# Altium footprint library Package_DFN_QFN.PcbLib: 735 footprints (part 33 of 46)
Each footprint in its own frame and in the unit in brackets; x right, y up, seen from the top. Pads: shape width x height; smd on the part's side, far side on the other; paste and mask are expansions set on the pad; w line width, h text height; cw(c..) or ccw(c..) is an arc to the next point about the centre after c.
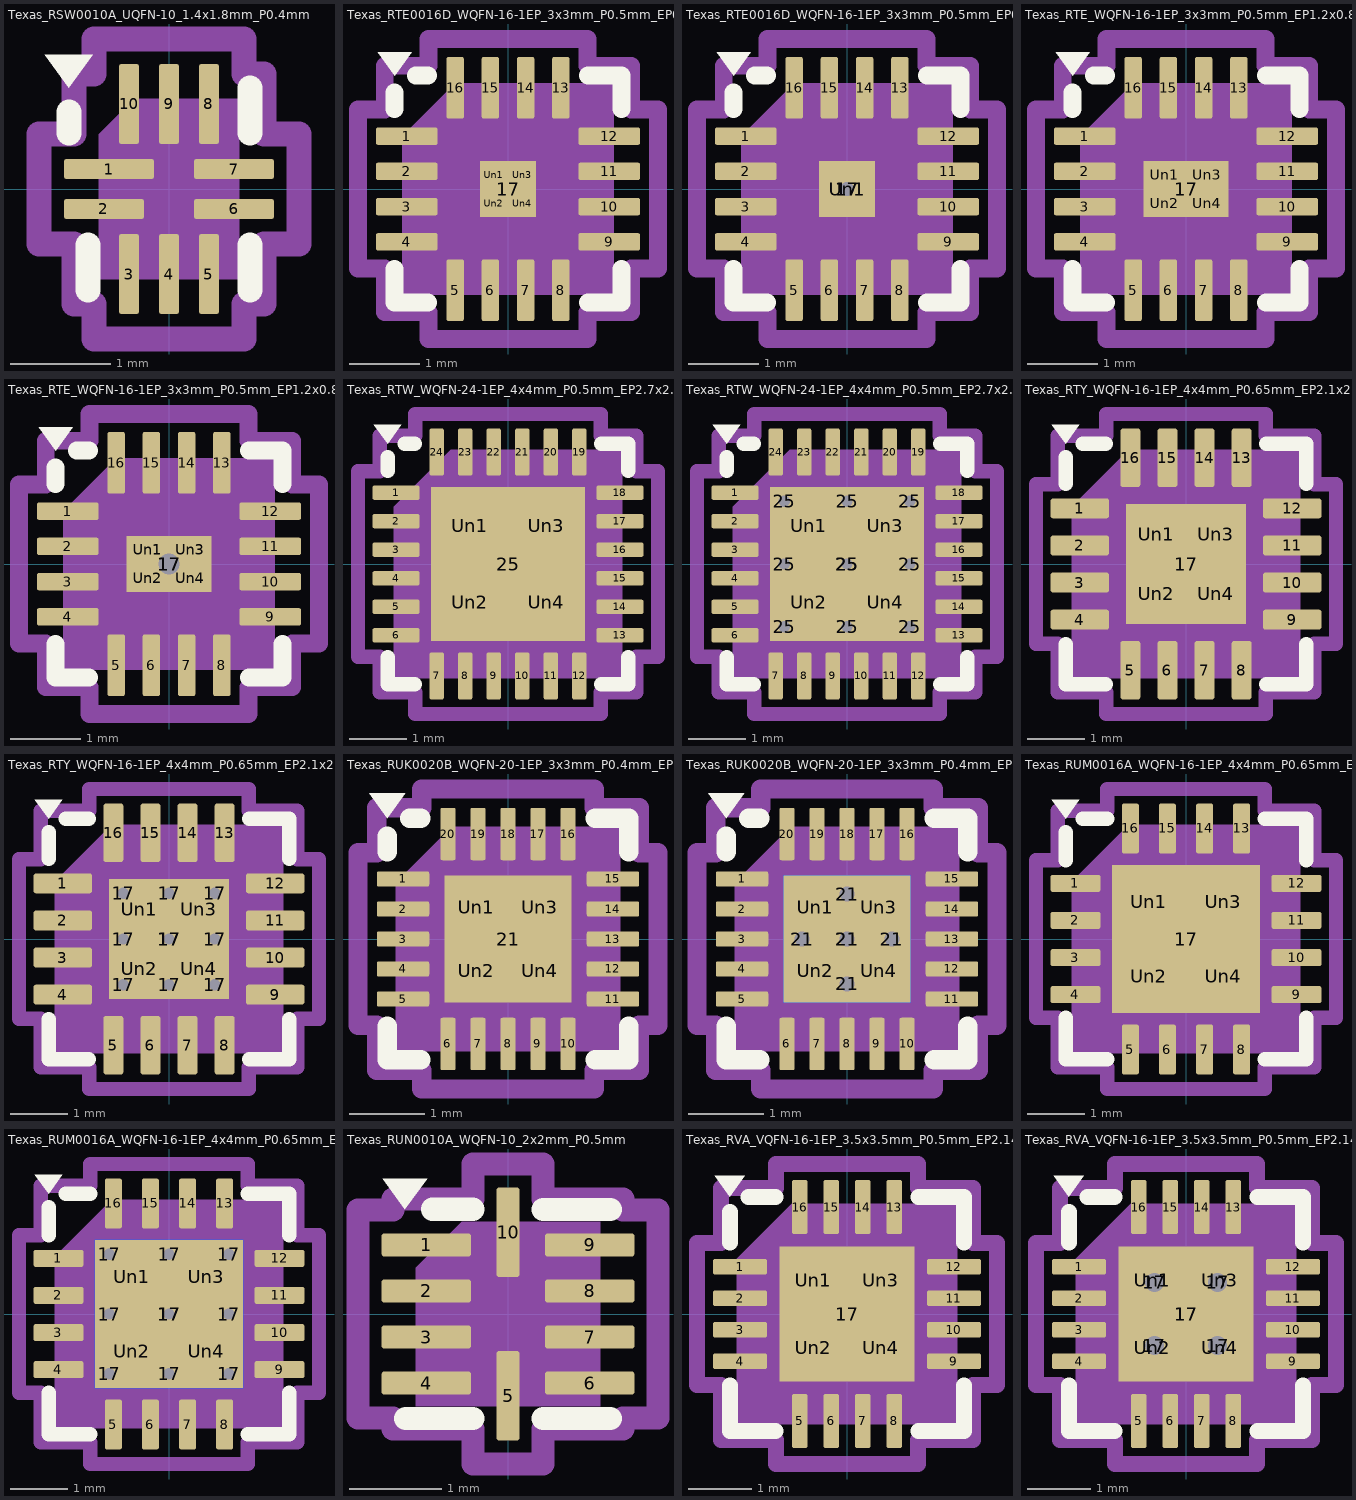
[diagram p32: the footprints below, top view; thin cyan lines are the x and y axes]

## Texas_RSW0010A_UQFN-10_1.4x1.8mm_P0.4mm [mm] "Texas_RSW0010A_UQFN-10_1.4x1.8mm_P0.4mm"
pads (10):
  rrect25% 0.9x0.2 smd: 1(-0.6,0.2)
  rrect25% 0.8x0.2 smd: 2(-0.65,-0.2) 6(0.65,-0.2) 7(0.65,0.2)
  rrect25% 0.2x0.8 smd: 3(-0.4,-0.85) 4(0,-0.85) 5(0.4,-0.85) 8(0.4,0.85) 9(0,0.85) 10(-0.4,0.85)
F.SilkS:
  region: -1,1.01 -1.24,1.34 -0.76,1.34
  lines w0.254: -1,0.56 -1,0.77 ; -0.81,-1.01 -0.81,-0.56 ; 0.81,-1.01 0.81,-0.56 ; 0.81,0.56 0.81,1.01
Top Component Center:
  lines w0.127: -0.127,0 0.127,0 -0.127,0 ; 0,-0.127 0,0.127 0,-0.127
Top Assembly:
  region: 0.7,-0.9 -0.7,-0.9 -0.7,0.55 -0.35,0.9 0.7,0.9
Top Courtyard:
  lines w0.254: -1.3,-0.55 -0.95,-0.55 -0.95,-1.15 -0.75,-1.15 -0.75,-1.5 0.75,-1.5 0.75,-1.15 0.95,-1.15 0.95,-0.55 1.3,-0.55 1.3,0.55 0.95,0.55 0.95,1.15 0.75,1.15 0.75,1.5 -0.75,1.5 -0.75,1.15 -0.95,1.15 -0.95,0.55 -1.3,0.55 -1.3,-0.55
Top Designator:
  text ".Designator" at -2.251,-0.226 h1

## Texas_RTE0016D_WQFN-16-1EP_3x3mm_P0.5mm_EP0.8x0.8mm [mm] "Texas_RTE0016D_WQFN-16-1EP_3x3mm_P0.5mm_EP0.8x0.8mm"
pads (21):
  rrect25% 0.875x0.25 smd: 1(-1.438,0.75) 2(-1.438,0.25) 3(-1.438,-0.25) 4(-1.438,-0.75) 9(1.438,-0.75) 10(1.438,-0.25) 11(1.438,0.25) 12(1.438,0.75)
  rrect25% 0.25x0.875 smd: 5(-0.75,-1.438) 6(-0.25,-1.438) 7(0.25,-1.438) 8(0.75,-1.438) 13(0.75,1.438) 14(0.25,1.438) 15(-0.25,1.438) 16(-0.75,1.438)
  rect 0.8x0.8 smd: 17(0,0)
  rrect25% 0.32x0.32 on Top Paste: Un1(-0.2,0.2) Un2(-0.2,-0.2) Un3(0.2,0.2) Un4(0.2,-0.2)
F.SilkS:
  region: -1.61,1.61 -1.85,1.94 -1.37,1.94
  lines w0.254: -1.61,-1.135 -1.61,-1.61 -1.135,-1.61 ; -1.61,1.135 -1.61,1.37 ; -1.31,1.61 -1.135,1.61 ; 1.135,-1.61 1.61,-1.61 1.61,-1.135 ; 1.135,1.61 1.61,1.61 1.61,1.135
Top Component Center:
  lines w0.127: -0.127,0 0.127,0 -0.127,0 ; 0,-0.127 0,0.127 0,-0.127
Top Assembly:
  region: 1.5,-1.5 -1.5,-1.5 -1.5,0.75 -0.75,1.5 1.5,1.5
Top Courtyard:
  lines w0.254: -2.13,-1.13 -1.75,-1.13 -1.75,-1.75 -1.13,-1.75 -1.13,-2.13 1.13,-2.13 1.13,-1.75 1.75,-1.75 1.75,-1.13 2.13,-1.13 2.13,1.13 1.75,1.13 1.75,1.75 1.13,1.75 1.13,2.13 -1.13,2.13 -1.13,1.75 -1.75,1.75 -1.75,1.13 -2.13,1.13 -2.13,-1.13
Top Designator:
  text ".Designator" at -3.43,-0.344 h1.52

## Texas_RTE0016D_WQFN-16-1EP_3x3mm_P0.5mm_EP0.8x0.8mm_ThermalVias [mm] "Texas_RTE0016D_WQFN-16-1EP_3x3mm_P0.5mm_EP0.8x0.8mm_ThermalVias"
pads (20):
  rrect25% 0.875x0.25 smd: 1(-1.438,0.75) 2(-1.438,0.25) 3(-1.438,-0.25) 4(-1.438,-0.75) 9(1.438,-0.75) 10(1.438,-0.25) 11(1.438,0.25) 12(1.438,0.75)
  rrect25% 0.25x0.875 smd: 5(-0.75,-1.438) 6(-0.25,-1.438) 7(0.25,-1.438) 8(0.75,-1.438) 13(0.75,1.438) 14(0.25,1.438) 15(-0.25,1.438) 16(-0.75,1.438)
  rect 0.8x0.8 smd: 17(0,0)
  round 0.5 hole 0.2: 17(0,0)
  rect 0.5x0.5 smd far side: 17(0,0)
  rrect25% 0.76x0.76 on Top Paste: Un1(0,0)
F.SilkS:
  region: -1.61,1.61 -1.85,1.94 -1.37,1.94
  lines w0.254: -1.61,-1.135 -1.61,-1.61 -1.135,-1.61 ; -1.61,1.135 -1.61,1.37 ; -1.31,1.61 -1.135,1.61 ; 1.135,-1.61 1.61,-1.61 1.61,-1.135 ; 1.135,1.61 1.61,1.61 1.61,1.135
Top Component Center:
  lines w0.127: -0.127,0 0.127,0 -0.127,0 ; 0,-0.127 0,0.127 0,-0.127
Top Assembly:
  region: 1.5,-1.5 -1.5,-1.5 -1.5,0.75 -0.75,1.5 1.5,1.5
Top Courtyard:
  lines w0.254: -2.13,-1.13 -1.75,-1.13 -1.75,-1.75 -1.13,-1.75 -1.13,-2.13 1.13,-2.13 1.13,-1.75 1.75,-1.75 1.75,-1.13 2.13,-1.13 2.13,1.13 1.75,1.13 1.75,1.75 1.13,1.75 1.13,2.13 -1.13,2.13 -1.13,1.75 -1.75,1.75 -1.75,1.13 -2.13,1.13 -2.13,-1.13
Top Designator:
  text ".Designator" at -3.43,-0.344 h1.52

## Texas_RTE_WQFN-16-1EP_3x3mm_P0.5mm_EP1.2x0.8mm [mm] "Texas_RTE_WQFN-16-1EP_3x3mm_P0.5mm_EP1.2x0.8mm"
pads (21):
  rrect25% 0.875x0.25 smd: 1(-1.438,0.75) 2(-1.438,0.25) 3(-1.438,-0.25) 4(-1.438,-0.75) 9(1.438,-0.75) 10(1.438,-0.25) 11(1.438,0.25) 12(1.438,0.75)
  rrect25% 0.25x0.875 smd: 5(-0.75,-1.438) 6(-0.25,-1.438) 7(0.25,-1.438) 8(0.75,-1.438) 13(0.75,1.438) 14(0.25,1.438) 15(-0.25,1.438) 16(-0.75,1.438)
  rect 1.2x0.8 smd: 17(0,0)
  rrect25% 0.48x0.32 on Top Paste: Un1(-0.3,0.2) Un2(-0.3,-0.2) Un3(0.3,0.2) Un4(0.3,-0.2)
F.SilkS:
  region: -1.61,1.61 -1.85,1.94 -1.37,1.94
  lines w0.254: -1.61,-1.135 -1.61,-1.61 -1.135,-1.61 ; -1.61,1.135 -1.61,1.37 ; -1.31,1.61 -1.135,1.61 ; 1.135,-1.61 1.61,-1.61 1.61,-1.135 ; 1.135,1.61 1.61,1.61 1.61,1.135
Top Component Center:
  lines w0.127: -0.127,0 0.127,0 -0.127,0 ; 0,-0.127 0,0.127 0,-0.127
Top Assembly:
  region: 1.5,-1.5 -1.5,-1.5 -1.5,0.75 -0.75,1.5 1.5,1.5
Top Courtyard:
  lines w0.254: -2.13,-1.13 -1.75,-1.13 -1.75,-1.75 -1.13,-1.75 -1.13,-2.13 1.13,-2.13 1.13,-1.75 1.75,-1.75 1.75,-1.13 2.13,-1.13 2.13,1.13 1.75,1.13 1.75,1.75 1.13,1.75 1.13,2.13 -1.13,2.13 -1.13,1.75 -1.75,1.75 -1.75,1.13 -2.13,1.13 -2.13,-1.13
Top Designator:
  text ".Designator" at -3.43,-0.344 h1.52

## Texas_RTE_WQFN-16-1EP_3x3mm_P0.5mm_EP1.2x0.8mm_ThermalVias [mm] "Texas_RTE_WQFN-16-1EP_3x3mm_P0.5mm_EP1.2x0.8mm_ThermalVias"
pads (23):
  rrect25% 0.875x0.25 smd: 1(-1.438,0.75) 2(-1.438,0.25) 3(-1.438,-0.25) 4(-1.438,-0.75) 9(1.438,-0.75) 10(1.438,-0.25) 11(1.438,0.25) 12(1.438,0.75)
  rrect25% 0.25x0.875 smd: 5(-0.75,-1.438) 6(-0.25,-1.438) 7(0.25,-1.438) 8(0.75,-1.438) 13(0.75,1.438) 14(0.25,1.438) 15(-0.25,1.438) 16(-0.75,1.438)
  rect 1.2x0.8 smd: 17(0,0)
  round 0.6 hole 0.3: 17(0,0)
  rect 0.6x0.6 smd far side: 17(0,0)
  rrect25% 0.5x0.33 on Top Paste: Un1(-0.3,0.2) Un2(-0.3,-0.2) Un3(0.3,0.2) Un4(0.3,-0.2)
F.SilkS:
  region: -1.61,1.61 -1.85,1.94 -1.37,1.94
  lines w0.254: -1.61,-1.135 -1.61,-1.61 -1.135,-1.61 ; -1.61,1.135 -1.61,1.37 ; -1.31,1.61 -1.135,1.61 ; 1.135,-1.61 1.61,-1.61 1.61,-1.135 ; 1.135,1.61 1.61,1.61 1.61,1.135
Top Component Center:
  lines w0.127: -0.127,0 0.127,0 -0.127,0 ; 0,-0.127 0,0.127 0,-0.127
Top Assembly:
  region: 1.5,-1.5 -1.5,-1.5 -1.5,0.75 -0.75,1.5 1.5,1.5
Top Courtyard:
  lines w0.254: -2.13,-1.13 -1.75,-1.13 -1.75,-1.75 -1.13,-1.75 -1.13,-2.13 1.13,-2.13 1.13,-1.75 1.75,-1.75 1.75,-1.13 2.13,-1.13 2.13,1.13 1.75,1.13 1.75,1.75 1.13,1.75 1.13,2.13 -1.13,2.13 -1.13,1.75 -1.75,1.75 -1.75,1.13 -2.13,1.13 -2.13,-1.13
Top Designator:
  text ".Designator" at -3.43,-0.344 h1.52

## Texas_RTW_WQFN-24-1EP_4x4mm_P0.5mm_EP2.7x2.7mm [mm] "Texas_RTW_WQFN-24-1EP_4x4mm_P0.5mm_EP2.7x2.7mm"
pads (29):
  rrect25% 0.825x0.25 smd: 1(-1.963,1.25) 2(-1.963,0.75) 3(-1.963,0.25) 4(-1.963,-0.25) 5(-1.963,-0.75) 6(-1.963,-1.25) 13(1.963,-1.25) 14(1.963,-0.75) 15(1.963,-0.25) 16(1.963,0.25) 17(1.963,0.75) 18(1.963,1.25)
  rrect25% 0.25x0.825 smd: 7(-1.25,-1.963) 8(-0.75,-1.963) 9(-0.25,-1.963) 10(0.25,-1.963) 11(0.75,-1.963) 12(1.25,-1.963) 19(1.25,1.963) 20(0.75,1.963) 21(0.25,1.963) 22(-0.25,1.963) 23(-0.75,1.963) 24(-1.25,1.963)
  rect 2.7x2.7 smd: 25(0,0)
  rrect23% 1.09x1.09 on Top Paste: Un1(-0.675,0.675) Un2(-0.675,-0.675) Un3(0.675,0.675) Un4(0.675,-0.675)
F.SilkS:
  region: -2.11,2.11 -2.35,2.44 -1.87,2.44
  lines w0.254: -2.11,-1.635 -2.11,-2.11 -1.635,-2.11 ; -2.11,1.635 -2.11,1.87 ; -1.81,2.11 -1.635,2.11 ; 1.635,-2.11 2.11,-2.11 2.11,-1.635 ; 1.635,2.11 2.11,2.11 2.11,1.635
Top Component Center:
  lines w0.127: -0.127,0 0.127,0 -0.127,0 ; 0,-0.127 0,0.127 0,-0.127
Top Assembly:
  region: 2,-2 -2,-2 -2,1 -1,2 2,2
Top Courtyard:
  lines w0.254: -2.63,-1.63 -2.63,1.63 -2.25,1.63 -2.25,2.25 -1.63,2.25 -1.63,2.63 1.63,2.63 1.63,2.25 2.25,2.25 2.25,1.63 2.63,1.63 2.63,-1.63 2.25,-1.63 2.25,-2.25 1.63,-2.25 1.63,-2.63 -1.63,-2.63 -1.63,-2.25 -2.25,-2.25 -2.25,-1.63 -2.63,-1.63
Top Designator:
  text ".Designator" at -3.43,-0.344 h1.52
3D body "Texas_RTW_WQFN-24-1EP_4x4mm_P0.5mm_EP2.7x2.7mm.step": height 0.76, standoff 0, extent -2,-2 2,2

## Texas_RTW_WQFN-24-1EP_4x4mm_P0.5mm_EP2.7x2.7mm_ThermalVias [mm] "Texas_RTW_WQFN-24-1EP_4x4mm_P0.5mm_EP2.7x2.7mm_ThermalVias"
pads (39):
  rrect25% 0.825x0.25 smd: 1(-1.963,1.25) 2(-1.963,0.75) 3(-1.963,0.25) 4(-1.963,-0.25) 5(-1.963,-0.75) 6(-1.963,-1.25) 13(1.963,-1.25) 14(1.963,-0.75) 15(1.963,-0.25) 16(1.963,0.25) 17(1.963,0.75) 18(1.963,1.25)
  rrect25% 0.25x0.825 smd: 7(-1.25,-1.963) 8(-0.75,-1.963) 9(-0.25,-1.963) 10(0.25,-1.963) 11(0.75,-1.963) 12(1.25,-1.963) 19(1.25,1.963) 20(0.75,1.963) 21(0.25,1.963) 22(-0.25,1.963) 23(-0.75,1.963) 24(-1.25,1.963)
  round 0.5 hole 0.2: 25(-1.1,-1.1) 25(-1.1,0) 25(-1.1,1.1) 25(0,-1.1) 25(0,0) 25(0,1.1) 25(1.1,-1.1) 25(1.1,0) 25(1.1,1.1)
  rect 2.7x2.7 smd: 25(0,0)
  rect 2.7x2.7 smd far side: 25(0,0)
  rrect22% 1.13x1.13 on Top Paste: Un1(-0.675,0.675) Un2(-0.675,-0.675) Un3(0.675,0.675) Un4(0.675,-0.675)
F.SilkS:
  region: -2.11,2.11 -2.35,2.44 -1.87,2.44
  lines w0.254: -2.11,-1.635 -2.11,-2.11 -1.635,-2.11 ; -2.11,1.635 -2.11,1.87 ; -1.81,2.11 -1.635,2.11 ; 1.635,-2.11 2.11,-2.11 2.11,-1.635 ; 1.635,2.11 2.11,2.11 2.11,1.635
Top Component Center:
  lines w0.127: -0.127,0 0.127,0 -0.127,0 ; 0,-0.127 0,0.127 0,-0.127
Top Assembly:
  region: 2,-2 -2,-2 -2,1 -1,2 2,2
Top Courtyard:
  lines w0.254: -2.63,-1.63 -2.25,-1.63 -2.25,-2.25 -1.63,-2.25 -1.63,-2.63 1.63,-2.63 1.63,-2.25 2.25,-2.25 2.25,-1.63 2.63,-1.63 2.63,1.63 2.25,1.63 2.25,2.25 1.63,2.25 1.63,2.63 -1.63,2.63 -1.63,2.25 -2.25,2.25 -2.25,1.63 -2.63,1.63 -2.63,-1.63
Top Designator:
  text ".Designator" at -3.43,-0.344 h1.52
3D body "Texas_RTW_WQFN-24-1EP_4x4mm_P0.5mm_EP2.7x2.7mm.step": height 0.76, standoff 0, extent -2,-2 2,2

## Texas_RTY_WQFN-16-1EP_4x4mm_P0.65mm_EP2.1x2.1mm [mm] "Texas_RTY_WQFN-16-1EP_4x4mm_P0.65mm_EP2.1x2.1mm"
pads (21):
  rrect25% 1.025x0.35 smd: 1(-1.863,0.975) 2(-1.863,0.325) 3(-1.863,-0.325) 4(-1.863,-0.975) 9(1.863,-0.975) 10(1.863,-0.325) 11(1.863,0.325) 12(1.863,0.975)
  rrect25% 0.35x1.025 smd: 5(-0.975,-1.863) 6(-0.325,-1.863) 7(0.325,-1.863) 8(0.975,-1.863) 13(0.975,1.863) 14(0.325,1.863) 15(-0.325,1.863) 16(-0.975,1.863)
  rect 2.1x2.1 smd: 17(0,0)
  rrect25% 0.85x0.85 on Top Paste: Un1(-0.525,0.525) Un2(-0.525,-0.525) Un3(0.525,0.525) Un4(0.525,-0.525)
F.SilkS:
  region: -2.11,2.11 -2.35,2.44 -1.87,2.44
  lines w0.254: -2.11,-1.41 -2.11,-2.11 -1.41,-2.11 ; -2.11,1.41 -2.11,1.87 ; -1.81,2.11 -1.41,2.11 ; 1.41,-2.11 2.11,-2.11 2.11,-1.41 ; 1.41,2.11 2.11,2.11 2.11,1.41
Top Component Center:
  lines w0.127: -0.127,0 0.127,0 -0.127,0 ; 0,-0.127 0,0.127 0,-0.127
Top Assembly:
  region: 2,-2 -2,-2 -2,1 -1,2 2,2
Top Courtyard:
  lines w0.254: -2.63,-1.4 -2.25,-1.4 -2.25,-2.25 -1.4,-2.25 -1.4,-2.63 1.4,-2.63 1.4,-2.25 2.25,-2.25 2.25,-1.4 2.63,-1.4 2.63,1.4 2.25,1.4 2.25,2.25 1.4,2.25 1.4,2.63 -1.4,2.63 -1.4,2.25 -2.25,2.25 -2.25,1.4 -2.63,1.4 -2.63,-1.4
Top Designator:
  text ".Designator" at -3.43,-0.344 h1.52

## Texas_RTY_WQFN-16-1EP_4x4mm_P0.65mm_EP2.1x2.1mm_ThermalVias [mm] "Texas_RTY_WQFN-16-1EP_4x4mm_P0.65mm_EP2.1x2.1mm_ThermalVias"
pads (31):
  rrect25% 1.025x0.35 smd: 1(-1.863,0.975) 2(-1.863,0.325) 3(-1.863,-0.325) 4(-1.863,-0.975) 9(1.863,-0.975) 10(1.863,-0.325) 11(1.863,0.325) 12(1.863,0.975)
  rrect25% 0.35x1.025 smd: 5(-0.975,-1.863) 6(-0.325,-1.863) 7(0.325,-1.863) 8(0.975,-1.863) 13(0.975,1.863) 14(0.325,1.863) 15(-0.325,1.863) 16(-0.975,1.863)
  round 0.5 hole 0.2: 17(-0.8,-0.8) 17(-0.8,0) 17(-0.8,0.8) 17(0,-0.8) 17(0,0) 17(0,0.8) 17(0.8,-0.8) 17(0.8,0) 17(0.8,0.8)
  rect 2.1x2.1 smd: 17(0,0)
  rect 2.1x2.1 smd far side: 17(0,0)
  rrect25% 0.88x0.88 on Top Paste: Un1(-0.525,0.525) Un2(-0.525,-0.525) Un3(0.525,0.525) Un4(0.525,-0.525)
F.SilkS:
  region: -2.11,2.11 -2.35,2.44 -1.87,2.44
  lines w0.254: -2.11,-1.41 -2.11,-2.11 -1.41,-2.11 ; -2.11,1.41 -2.11,1.87 ; -1.81,2.11 -1.41,2.11 ; 1.41,-2.11 2.11,-2.11 2.11,-1.41 ; 1.41,2.11 2.11,2.11 2.11,1.41
Top Component Center:
  lines w0.127: -0.127,0 0.127,0 -0.127,0 ; 0,-0.127 0,0.127 0,-0.127
Top Assembly:
  region: 2,-2 -2,-2 -2,1 -1,2 2,2
Top Courtyard:
  lines w0.254: -2.63,-1.4 -2.63,1.4 -2.25,1.4 -2.25,2.25 -1.4,2.25 -1.4,2.63 1.4,2.63 1.4,2.25 2.25,2.25 2.25,1.4 2.63,1.4 2.63,-1.4 2.25,-1.4 2.25,-2.25 1.4,-2.25 1.4,-2.63 -1.4,-2.63 -1.4,-2.25 -2.25,-2.25 -2.25,-1.4 -2.63,-1.4
Top Designator:
  text ".Designator" at -3.43,-0.344 h1.52

## Texas_RUK0020B_WQFN-20-1EP_3x3mm_P0.4mm_EP1.7x1.7mm [mm] "Texas_RUK0020B_WQFN-20-1EP_3x3mm_P0.4mm_EP1.7x1.7mm"
pads (25):
  rrect25% 0.7x0.2 smd: 1(-1.4,0.8) 2(-1.4,0.4) 3(-1.4,0) 4(-1.4,-0.4) 5(-1.4,-0.8) 11(1.4,-0.8) 12(1.4,-0.4) 13(1.4,0) 14(1.4,0.4) 15(1.4,0.8)
  rrect25% 0.2x0.7 smd: 6(-0.8,-1.4) 7(-0.4,-1.4) 8(0,-1.4) 9(0.4,-1.4) 10(0.8,-1.4) 16(0.8,1.4) 17(0.4,1.4) 18(0,1.4) 19(-0.4,1.4) 20(-0.8,1.4)
  rect 1.7x1.7 smd: 21(0,0)
  rrect25% 0.69x0.69 on Top Paste: Un1(-0.425,0.425) Un2(-0.425,-0.425) Un3(0.425,0.425) Un4(0.425,-0.425)
F.SilkS:
  region: -1.61,1.61 -1.85,1.94 -1.37,1.94
  lines w0.254: -1.61,-1.16 -1.61,-1.61 -1.16,-1.61 ; -1.61,1.16 -1.61,1.37 ; -1.31,1.61 -1.16,1.61 ; 1.16,-1.61 1.61,-1.61 1.61,-1.16 ; 1.16,1.61 1.61,1.61 1.61,1.16
Top Component Center:
  lines w0.127: -0.127,0 0.127,0 -0.127,0 ; 0,-0.127 0,0.127 0,-0.127
Top Assembly:
  region: 1.5,-1.5 -1.5,-1.5 -1.5,0.75 -0.75,1.5 1.5,1.5
Top Courtyard:
  lines w0.254: -2,-1.15 -1.75,-1.15 -1.75,-1.75 -1.15,-1.75 -1.15,-2 1.15,-2 1.15,-1.75 1.75,-1.75 1.75,-1.15 2,-1.15 2,1.15 1.75,1.15 1.75,1.75 1.15,1.75 1.15,2 -1.15,2 -1.15,1.75 -1.75,1.75 -1.75,1.15 -2,1.15 -2,-1.15
Top Designator:
  text ".Designator" at -3.43,-0.344 h1.52

## Texas_RUK0020B_WQFN-20-1EP_3x3mm_P0.4mm_EP1.7x1.7mm_ThermalVias [mm] "Texas_RUK0020B_WQFN-20-1EP_3x3mm_P0.4mm_EP1.7x1.7mm_ThermalVias"
pads (31):
  rrect25% 0.7x0.2 smd: 1(-1.4,0.8) 2(-1.4,0.4) 3(-1.4,0) 4(-1.4,-0.4) 5(-1.4,-0.8) 11(1.4,-0.8) 12(1.4,-0.4) 13(1.4,0) 14(1.4,0.4) 15(1.4,0.8)
  rrect25% 0.2x0.7 smd: 6(-0.8,-1.4) 7(-0.4,-1.4) 8(0,-1.4) 9(0.4,-1.4) 10(0.8,-1.4) 16(0.8,1.4) 17(0.4,1.4) 18(0,1.4) 19(-0.4,1.4) 20(-0.8,1.4)
  round 0.5 hole 0.2: 21(-0.6,0) 21(0,-0.6) 21(0,0) 21(0,0.6) 21(0.6,0)
  rect 1.7x1.7 smd: 21(0,0)
  rect 1.7x1.7 smd far side: 21(0,0)
  rrect25% 0.75x0.75 on Top Paste: Un1(-0.425,0.425) Un2(-0.425,-0.425) Un3(0.425,0.425) Un4(0.425,-0.425)
F.SilkS:
  region: -1.61,1.61 -1.85,1.94 -1.37,1.94
  lines w0.254: -1.61,-1.16 -1.61,-1.61 -1.16,-1.61 ; -1.61,1.16 -1.61,1.37 ; -1.31,1.61 -1.16,1.61 ; 1.16,-1.61 1.61,-1.61 1.61,-1.16 ; 1.16,1.61 1.61,1.61 1.61,1.16
Top Component Center:
  lines w0.127: -0.127,0 0.127,0 -0.127,0 ; 0,-0.127 0,0.127 0,-0.127
Top Assembly:
  region: 1.5,-1.5 -1.5,-1.5 -1.5,0.75 -0.75,1.5 1.5,1.5
Top Courtyard:
  lines w0.254: -2,-1.15 -2,1.15 -1.75,1.15 -1.75,1.75 -1.15,1.75 -1.15,2 1.15,2 1.15,1.75 1.75,1.75 1.75,1.15 2,1.15 2,-1.15 1.75,-1.15 1.75,-1.75 1.15,-1.75 1.15,-2 -1.15,-2 -1.15,-1.75 -1.75,-1.75 -1.75,-1.15 -2,-1.15
Top Designator:
  text ".Designator" at -3.43,-0.344 h1.52

## Texas_RUM0016A_WQFN-16-1EP_4x4mm_P0.65mm_EP2.6x2.6mm [mm] "Texas_RUM0016A_WQFN-16-1EP_4x4mm_P0.65mm_EP2.6x2.6mm"
pads (21):
  rrect25% 0.875x0.3 smd: 1(-1.937,0.975) 2(-1.937,0.325) 3(-1.937,-0.325) 4(-1.937,-0.975) 9(1.937,-0.975) 10(1.937,-0.325) 11(1.937,0.325) 12(1.937,0.975)
  rrect25% 0.3x0.875 smd: 5(-0.975,-1.937) 6(-0.325,-1.937) 7(0.325,-1.937) 8(0.975,-1.937) 13(0.975,1.937) 14(0.325,1.937) 15(-0.325,1.937) 16(-0.975,1.937)
  rect 2.6x2.6 smd: 17(0,0)
  rrect24% 1.05x1.05 on Top Paste: Un1(-0.65,0.65) Un2(-0.65,-0.65) Un3(0.65,0.65) Un4(0.65,-0.65)
F.SilkS:
  region: -2.11,2.11 -2.35,2.44 -1.87,2.44
  lines w0.254: -2.11,-1.385 -2.11,-2.11 -1.385,-2.11 ; -2.11,1.385 -2.11,1.87 ; -1.81,2.11 -1.385,2.11 ; 1.385,-2.11 2.11,-2.11 2.11,-1.385 ; 1.385,2.11 2.11,2.11 2.11,1.385
Top Component Center:
  lines w0.127: -0.127,0 0.127,0 -0.127,0 ; 0,-0.127 0,0.127 0,-0.127
Top Assembly:
  region: 2,-2 -2,-2 -2,1 -1,2 2,2
Top Courtyard:
  lines w0.254: -2.63,-1.38 -2.63,1.38 -2.25,1.38 -2.25,2.25 -1.38,2.25 -1.38,2.63 1.38,2.63 1.38,2.25 2.25,2.25 2.25,1.38 2.63,1.38 2.63,-1.38 2.25,-1.38 2.25,-2.25 1.38,-2.25 1.38,-2.63 -1.38,-2.63 -1.38,-2.25 -2.25,-2.25 -2.25,-1.38 -2.63,-1.38
Top Designator:
  text ".Designator" at -3.43,-0.344 h1.52

## Texas_RUM0016A_WQFN-16-1EP_4x4mm_P0.65mm_EP2.6x2.6mm_ThermalVias [mm] "Texas_RUM0016A_WQFN-16-1EP_4x4mm_P0.65mm_EP2.6x2.6mm_ThermalVias"
pads (31):
  rrect25% 0.875x0.3 smd: 1(-1.937,0.975) 2(-1.937,0.325) 3(-1.937,-0.325) 4(-1.937,-0.975) 9(1.937,-0.975) 10(1.937,-0.325) 11(1.937,0.325) 12(1.937,0.975)
  rrect25% 0.3x0.875 smd: 5(-0.975,-1.937) 6(-0.325,-1.937) 7(0.325,-1.937) 8(0.975,-1.937) 13(0.975,1.937) 14(0.325,1.937) 15(-0.325,1.937) 16(-0.975,1.937)
  round 0.5 hole 0.2: 17(-1.05,-1.05) 17(-1.05,0) 17(-1.05,1.05) 17(0,-1.05) 17(0,0) 17(0,1.05) 17(1.05,-1.05) 17(1.05,0) 17(1.05,1.05)
  rect 2.6x2.6 smd: 17(0,0)
  rect 2.6x2.6 smd far side: 17(0,0)
  rrect22% 1.12x1.12 on Top Paste: Un1(-0.65,0.65) Un2(-0.65,-0.65) Un3(0.65,0.65) Un4(0.65,-0.65)
F.SilkS:
  region: -2.11,2.11 -2.35,2.44 -1.87,2.44
  lines w0.254: -2.11,-1.385 -2.11,-2.11 -1.385,-2.11 ; -2.11,1.385 -2.11,1.87 ; -1.81,2.11 -1.385,2.11 ; 1.385,-2.11 2.11,-2.11 2.11,-1.385 ; 1.385,2.11 2.11,2.11 2.11,1.385
Top Component Center:
  lines w0.127: -0.127,0 0.127,0 -0.127,0 ; 0,-0.127 0,0.127 0,-0.127
Top Assembly:
  region: 2,-2 -2,-2 -2,1 -1,2 2,2
Top Courtyard:
  lines w0.254: -2.63,-1.38 -2.25,-1.38 -2.25,-2.25 -1.38,-2.25 -1.38,-2.63 1.38,-2.63 1.38,-2.25 2.25,-2.25 2.25,-1.38 2.63,-1.38 2.63,1.38 2.25,1.38 2.25,2.25 1.38,2.25 1.38,2.63 -1.38,2.63 -1.38,2.25 -2.25,2.25 -2.25,1.38 -2.63,1.38 -2.63,-1.38
Top Designator:
  text ".Designator" at -3.43,-0.344 h1.52

## Texas_RUN0010A_WQFN-10_2x2mm_P0.5mm [mm] "Texas_RUN0010A_WQFN-10_2x2mm_P0.5mm"
pads (10):
  rrect25% 0.975x0.25 smd: 1(-0.887,0.75) 2(-0.887,0.25) 3(-0.887,-0.25) 4(-0.887,-0.75) 6(0.887,-0.75) 7(0.887,-0.25) 8(0.887,0.25) 9(0.887,0.75)
  rrect25% 0.25x0.975 smd: 5(0,-0.887) 10(0,0.887)
F.SilkS:
  region: -1.12,1.14 -1.36,1.47 -0.88,1.47
  lines w0.254: -1.11,-1.135 -0.385,-1.135 ; -0.82,1.14 -0.385,1.14 ; 0.385,-1.135 1.11,-1.135 ; 0.385,1.135 1.11,1.135
Top Component Center:
  lines w0.127: -0.127,0 0.127,0 -0.127,0 ; 0,-0.127 0,0.127 0,-0.127
Top Assembly:
  region: 1,-1 -1,-1 -1,0.5 -0.5,1 1,1
Top Courtyard:
  lines w0.254: -1.63,-1.13 -1.63,1.13 -1.25,1.13 -1.25,1.25 -0.38,1.25 -0.38,1.63 0.38,1.63 0.38,1.25 1.25,1.25 1.25,1.13 1.63,1.13 1.63,-1.13 1.25,-1.13 1.25,-1.25 0.38,-1.25 0.38,-1.63 -0.38,-1.63 -0.38,-1.25 -1.25,-1.25 -1.25,-1.13 -1.63,-1.13
Top Designator:
  text ".Designator" at -2.251,-0.226 h1
3D body "Texas_RUN0010A_WQFN-10_2x2mm_P0.5mm.step": height 0.76, standoff 0, extent -1,-1 1,1

## Texas_RVA_VQFN-16-1EP_3.5x3.5mm_P0.5mm_EP2.14x2.14mm [mm] "Texas_RVA_VQFN-16-1EP_3.5x3.5mm_P0.5mm_EP2.14x2.14mm"
pads (21):
  rrect25% 0.855x0.25 smd: 1(-1.697,0.75) 2(-1.697,0.25) 3(-1.697,-0.25) 4(-1.697,-0.75) 9(1.697,-0.75) 10(1.697,-0.25) 11(1.697,0.25) 12(1.697,0.75)
  rrect25% 0.25x0.855 smd: 5(-0.75,-1.697) 6(-0.25,-1.697) 7(0.25,-1.697) 8(0.75,-1.697) 13(0.75,1.697) 14(0.25,1.697) 15(-0.25,1.697) 16(-0.75,1.697)
  rect 2.14x2.14 smd: 17(0,0)
  rrect25% 0.86x0.86 on Top Paste: Un1(-0.535,0.535) Un2(-0.535,-0.535) Un3(0.535,0.535) Un4(0.535,-0.535)
F.SilkS:
  region: -1.86,1.86 -2.1,2.19 -1.62,2.19
  lines w0.254: -1.86,-1.135 -1.86,-1.86 -1.135,-1.86 ; -1.86,1.135 -1.86,1.62 ; -1.56,1.86 -1.135,1.86 ; 1.135,-1.86 1.86,-1.86 1.86,-1.135 ; 1.135,1.86 1.86,1.86 1.86,1.135
Top Component Center:
  lines w0.127: -0.127,0 0.127,0 -0.127,0 ; 0,-0.127 0,0.127 0,-0.127
Top Assembly:
  region: 1.75,-1.75 -1.75,-1.75 -1.75,0.875 -0.875,1.75 1.75,1.75
Top Courtyard:
  lines w0.254: -2.38,-1.13 -2,-1.13 -2,-2 -1.13,-2 -1.13,-2.38 1.13,-2.38 1.13,-2 2,-2 2,-1.13 2.38,-1.13 2.38,1.13 2,1.13 2,2 1.13,2 1.13,2.38 -1.13,2.38 -1.13,2 -2,2 -2,1.13 -2.38,1.13 -2.38,-1.13
Top Designator:
  text ".Designator" at -3.43,-0.344 h1.52

## Texas_RVA_VQFN-16-1EP_3.5x3.5mm_P0.5mm_EP2.14x2.14mm_ThermalVias [mm] "Texas_RVA_VQFN-16-1EP_3.5x3.5mm_P0.5mm_EP2.14x2.14mm_ThermalVias"
pads (26):
  rrect25% 0.855x0.25 smd: 1(-1.697,0.75) 2(-1.697,0.25) 3(-1.697,-0.25) 4(-1.697,-0.75) 9(1.697,-0.75) 10(1.697,-0.25) 11(1.697,0.25) 12(1.697,0.75)
  rrect25% 0.25x0.855 smd: 5(-0.75,-1.697) 6(-0.25,-1.697) 7(0.25,-1.697) 8(0.75,-1.697) 13(0.75,1.697) 14(0.25,1.697) 15(-0.25,1.697) 16(-0.75,1.697)
  round 0.6 hole 0.3: 17(-0.5,-0.5) 17(-0.5,0.5) 17(0.5,-0.5) 17(0.5,0.5)
  rect 2.14x2.14 smd: 17(0,0)
  rect 1.6x1.6 smd far side: 17(0,0)
  rrect25% 0.85x0.85 on Top Paste: Un1(-0.535,0.535) Un2(-0.535,-0.535) Un3(0.535,0.535) Un4(0.535,-0.535)
F.SilkS:
  region: -1.86,1.86 -2.1,2.19 -1.62,2.19
  lines w0.254: -1.86,-1.135 -1.86,-1.86 -1.135,-1.86 ; -1.86,1.135 -1.86,1.62 ; -1.56,1.86 -1.135,1.86 ; 1.135,-1.86 1.86,-1.86 1.86,-1.135 ; 1.135,1.86 1.86,1.86 1.86,1.135
Top Component Center:
  lines w0.127: -0.127,0 0.127,0 -0.127,0 ; 0,-0.127 0,0.127 0,-0.127
Top Assembly:
  region: 1.75,-1.75 -1.75,-1.75 -1.75,0.875 -0.875,1.75 1.75,1.75
Top Courtyard:
  lines w0.254: -2.38,-1.13 -2.38,1.13 -2,1.13 -2,2 -1.13,2 -1.13,2.38 1.13,2.38 1.13,2 2,2 2,1.13 2.38,1.13 2.38,-1.13 2,-1.13 2,-2 1.13,-2 1.13,-2.38 -1.13,-2.38 -1.13,-2 -2,-2 -2,-1.13 -2.38,-1.13
Top Designator:
  text ".Designator" at -3.43,-0.344 h1.52